# Altium footprint library Footprint_Vlad.PcbLib: 392 footprints (part 25 of 25)
Each footprint in its own frame and in the unit in brackets; x right, y up, seen from the top. Pads: shape width x height; smd on the part's side, far side on the other; paste and mask are expansions set on the pad; w line width, h text height; cw(c..) or ccw(c..) is an arc to the next point about the centre after c.
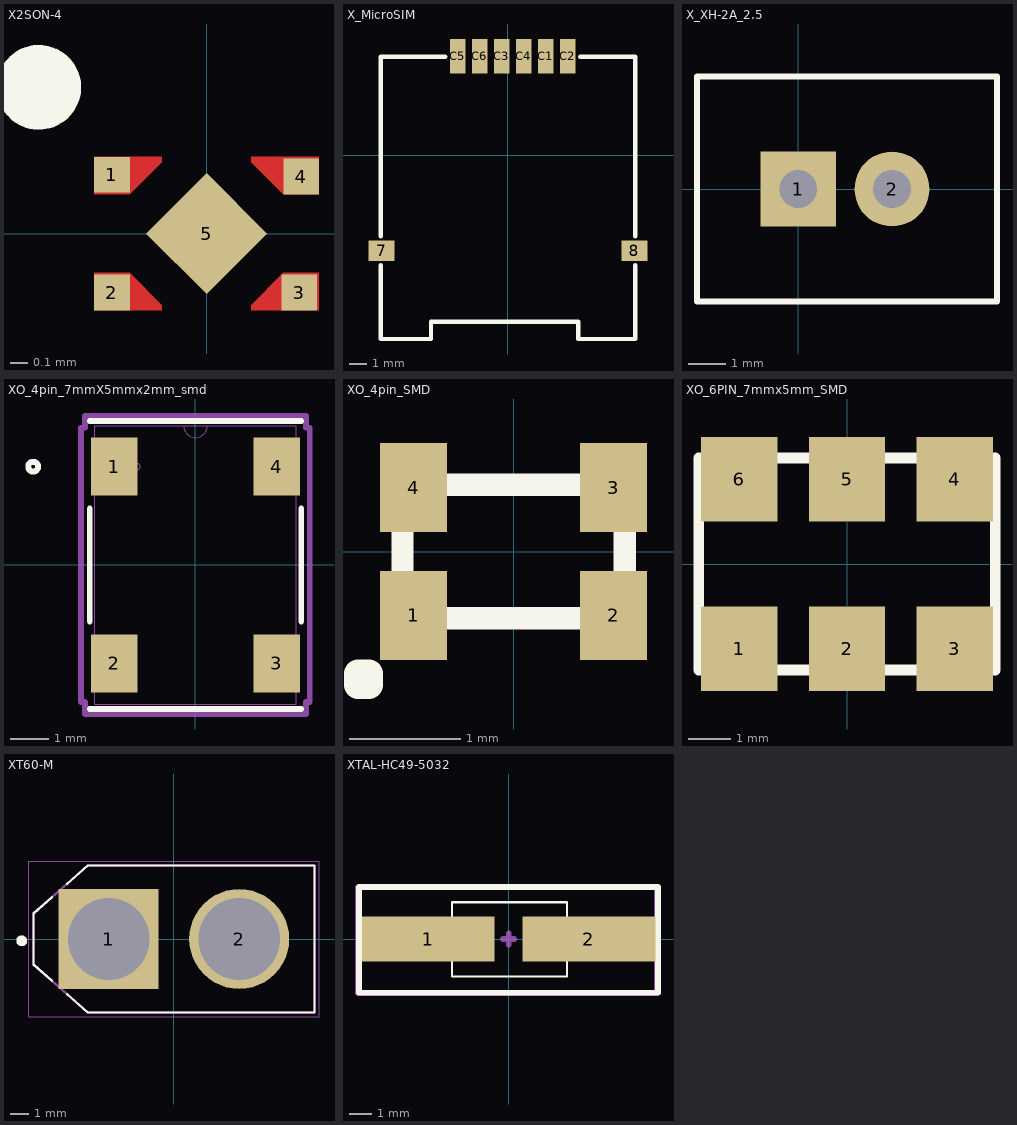
[diagram p24: the footprints below, top view; thin cyan lines are the x and y axes]

## X2SON-4 [mm]
pads (5):
  rect 0.2x0.2 smd mask+0: 1(-0.53,0.33) 2(-0.53,-0.33) 3(0.52,-0.33) 4(0.53,0.32)
  rect 0.48x0.48 smd rot 45: 5(0,0)
Top Layer:
  region: 0.63,-0.43 0.63,-0.22 0.43,-0.22 0.25,-0.4 0.25,-0.43
  region: -0.63,0.43 -0.63,0.22 -0.43,0.22 -0.25,0.4 -0.25,0.43
  region: 0.63,0.43 0.63,0.22 0.43,0.22 0.25,0.4 0.25,0.43
  region: -0.63,-0.43 -0.63,-0.22 -0.43,-0.22 -0.25,-0.4 -0.25,-0.43
Top Overlay:
  circle w0.254: c-0.94,0.82 r0.11
3D body: height 0.4, standoff 0, extent -0.525,-0.525 0.525,0.525

## X_MicroSIM [mm]
pads (8):
  rect 1.5x1.2 smd: 7(-7.3,-5.525) 8(7.3,-5.525)
  rect 0.9x2 smd: C1(2.18,5.7) C2(3.45,5.7) C3(-0.36,5.7) C4(0.91,5.7) C5(-2.9,5.7) C6(-1.63,5.7)
Top Overlay:
  lines w0.254: -7.35,-6.356 -7.35,-10.625 -4.445,-10.625 -4.445,-9.625 4.046,-9.625 4.046,-10.625 7.35,-10.625 7.35,-6.356 ; -7.35,-4.694 -7.35,5.675 -3.631,5.675 ; 4.181,5.675 7.35,5.675 7.35,-4.694

## X_XH-2A_2.5 [mm]
pads (2):
  rect 2x2 hole 1: 1(0,0)
  round 2 hole 1: 2(2.5,0)
Top Overlay:
  lines w0.15: -2.7,-3 -2.7,3 5.3,3 5.3,-3 -2.7,-3
3D body "User Library-XH2_54_2PIN.step": height 7, standoff -4, extent -2.7,-3 5.3,3

## XO_4pin_7mmX5mmx2mm_smd [mil]
height 78.74
pads (4):
  rect 47x59 smd paste+0 mask+0: 1(-82.68,100) 2(-82.68,-100) 3(82.68,-100) 4(82.68,100)
Top Overlay:
  circle w6: c-165,100 r5
  lines w6: -107.5,-146.5 107.5,-146.5 ; -107.5,-57.47 -107.5,57.47 ; -107.5,146.5 107.5,146.5 ; 107.5,-57.47 107.5,57.47
Mechanical 13:
  circle w0: c-59.18,100 r3
  lines w0: -12,141.5 ccw(c0,141.5) 12,141.5
  lines w1: -102.5,-141.5 102.5,-141.5 102.5,141.5 -102.5,141.5 -102.5,-141.5
Mechanical 15:
  lines w6: -116.18,-139.5 -116.18,139.5 -112.5,139.5 -112.5,151.5 112.5,151.5 112.5,139.5 116.18,139.5 116.18,-139.5 112.5,-139.5 112.5,-151.5 -112.5,-151.5 -112.5,-139.5 -116.18,-139.5
3D body "LFTCXO_IQD.step": height 94.09, standoff 0, extent -102.52,-141.5 102.52,141.5

## XO_4pin_SMD [mm]
pads (4):
  rect 0.6x0.8 smd: 1(-0.9,-0.575) 2(0.9,-0.575) 3(0.9,0.575) 4(-0.9,0.575)
Top Overlay:
  lines w0.2: -1,-0.6 1,-0.6 1,0.6 -1,0.6 -1,-0.6
  lines w0.254: -1.4,-1.2 -1.4,-1.1 -1.3,-1.1 -1.3,-1.2 -1.4,-1.2

## XO_6PIN_7mmx5mm_SMD [mm]
pads (6):
  rect 1.8x2 smd: 1(-2.54,-2) 2(0,-2) 3(2.54,-2) 4(2.54,2) 5(0,2) 6(-2.54,2)
Top Overlay:
  lines w0.254: -3.5,-2.5 -3.5,2.5 3.5,2.5 3.5,-2.5 -3.5,-2.5

## XT60-M [mm]
pads (2):
  rect 5.516x5.516 hole 4.5: 1(-3.6,0)
  round 5.516 hole 4.5: 2(3.6,0)
Top Overlay:
  circle w0.3: c-8.4,-0.1 r0.15
  lines w0.127: -6.73,-2.3 -7.75,-1.4 -7.75,1.4 -6.73,2.3 ; -5.88,-3.05 -4.75,-4.05 7.75,-4.05 7.75,4.05 -4.75,4.05 -5.88,3.05
Mechanical 13:
  lines w0.127: -7.75,-1.4 -4.75,-4.05 7.75,-4.05 7.75,4.05 -4.75,4.05 -7.75,1.4 -7.75,-1.4
Mechanical 15:
  lines w0.05: -8,-4.3 8,-4.3 8,4.3 -8,4.3 -8,-4.3
3D body "XT60-M--3DModel-STEP-56544.STEP": height 16, standoff -4.5, extent -7.75,-4.064 7.75,4.036

## XTAL-HC49-5032 [mm]
pads (2):
  rect 5.9x2 smd: 1(-3.575,0) 2(3.575,0)
Top Overlay:
  lines w0.1: -2.523,-1.663 -2.523,1.637 2.602,1.637 2.602,-1.663 -2.523,-1.663
  lines w0.254: -6.655,-2.39 -6.655,2.31 6.645,2.31 6.645,-2.39 -6.655,-2.39
Mechanical 15:
  lines w0.254: -0.254,0 0.254,0 ; 0,-0.254 0,0.254 ; -6.7,-2.4 6.6,-2.4 6.6,2.3 -6.7,2.3 -6.7,-2.4
  text ".Designator" at -2.5,2.7 h1.52